# Altium footprint library Mosfet$.PcbLib: 62 footprints (part 4 of 4)
Each footprint in its own frame and in the unit in brackets; x right, y up, seen from the top. Pads: shape width x height; smd on the part's side, far side on the other; paste and mask are expansions set on the pad; w line width, h text height; cw(c..) or ccw(c..) is an arc to the next point about the centre after c.
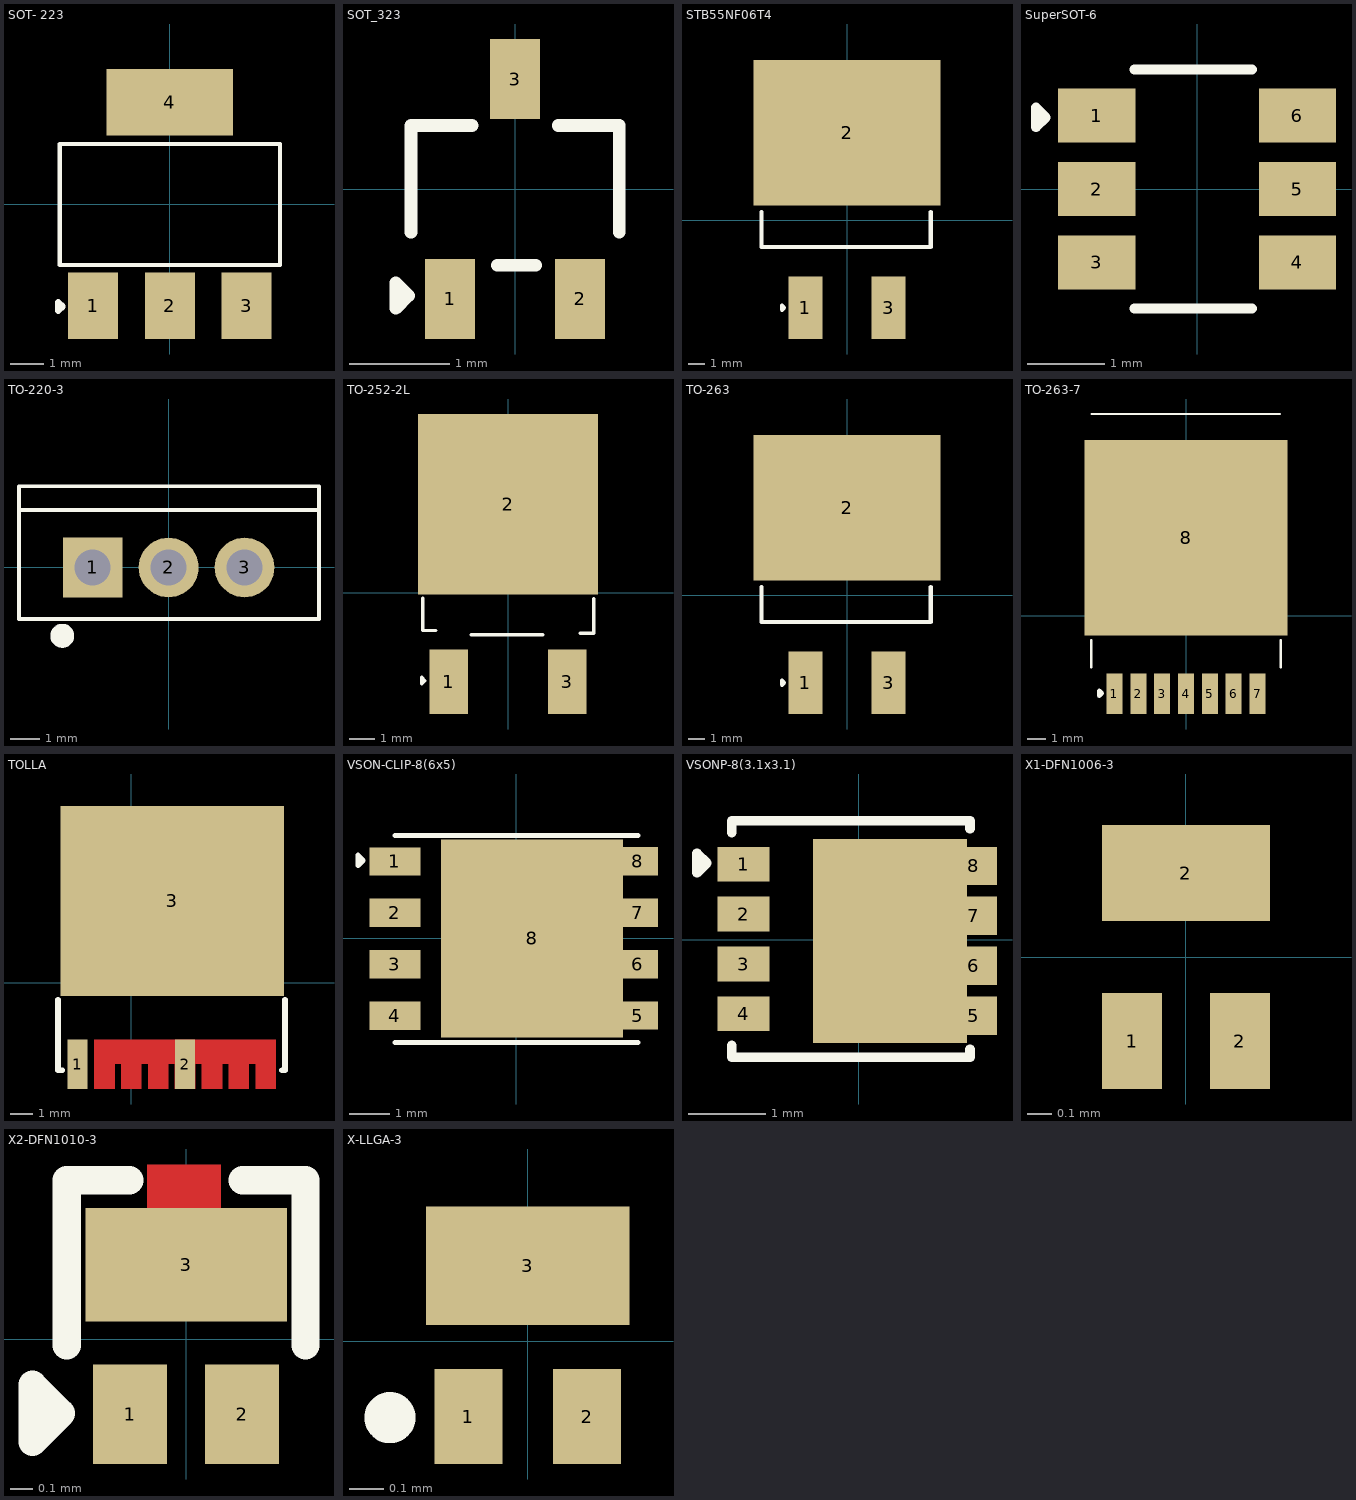
[diagram p3: the footprints below, top view; thin cyan lines are the x and y axes]

## SOT- 223 [mm]
pads (4):
  rect 1.5x2 smd: 1(-2.3,-3.05) 2(0,-3.05) 3(2.3,-3.05)
  rect 3.8x2 smd: 4(0,3.05)
Top Overlay:
  lines w0.127: -3.302,-1.829 3.302,-1.829 3.302,1.803 -3.302,1.803 -3.302,-1.829
  lines w0.2: -3.353,-3.2 -3.226,-3.073 -3.353,-2.946 -3.353,-3.2
3D body "User Library-SOT-223-1.step": height 1.61, standoff -0.04, extent -3.25,-3.5 3.25,3.5

## SOT_323 [mm]
pads (3):
  rect 0.5x0.8 smd: 1(-0.65,-1.1) 2(0.65,-1.1) 3(0,1.1)
Top Overlay:
  lines w0.127: -1.041,-0.432 -1.041,0.635 -0.432,0.635 ; -0.178,-0.762 0.203,-0.762 ; 0.432,0.635 1.041,0.635 1.041,-0.432 ; -1.194,-1.194 -1.067,-1.067 -1.194,-0.94 -1.194,-1.194
3D body "User Library-sc70-3.step": height 1, standoff 0, extent -1.05,-1.15 1.05,1.15

## STB55NF06T4 [mm]
pads (3):
  rect 2.08x3.81 smd: 1(-2.54,-5.335) 3(2.54,-5.335)
  rect 11.43x8.89 smd: 2(0,5.335)
Top Overlay:
  lines w0.254: -5.207,0.508 -5.207,-1.626 5.105,-1.626 5.105,0.508 ; -3.962,-5.461 -3.962,-5.207 -3.835,-5.334 -3.962,-5.461
3D body "pwr263s-35-8r20f.stp": height 4.5, standoff 0, extent -5.075,-6.596 5.025,8.794

## SuperSOT-6 [mm]
pads (6):
  rect 1x0.7 smd: 1(-1.3,0.95) 2(-1.3,0) 3(-1.3,-0.95) 4(1.3,-0.95) 5(1.3,0) 6(1.3,0.95)
Top Overlay:
  lines w0.127: -0.813,-1.549 0.711,-1.549 ; -0.813,1.549 0.711,1.549 ; -2.087,0.801 -2.087,1.055 -1.96,0.928 -2.087,0.801
3D body "User Library-SSOT-6.STEP": height 1.05, standoff 0, extent -1.5,-1.501 1.5,1.499

## TO-220-3 [mm]
pads (3):
  rect 2x2 hole 1.2 paste+0 mask+0.051: 1(-2.54,0)
  round 2 hole 1.2 paste+0 mask+0.051: 2(0,0) 3(2.54,0)
Top Overlay:
  lines w0.127: -5.004,1.925 5.029,1.925 ; -5.004,-1.727 5.029,-1.727 5.029,2.718 -5.004,2.718 -5.004,-1.727
  lines w0.4: -3.557,-2.086 ccw(c-3.556,-2.286) -3.555,-2.086
3D body "Mosfet.step": height 19.7, standoff -2.2, extent -5.05,-1.751 5.05,2.75

## TO-252-2L [mm]
pads (3):
  rect 1.5x2.5 smd: 1(-2.3,-3.45) 3(2.3,-3.45)
  rect 7x7 smd: 2(0,3.45)
Top Overlay:
  lines w0.127: -3.308,-0.203 -3.308,-1.457 -2.794,-1.457 ; -1.422,-1.626 1.346,-1.626 ; 2.794,-1.563 3.329,-1.563 3.329,-0.227 ; -3.353,-3.531 -3.226,-3.404 -3.353,-3.277 -3.353,-3.531
3D body "User Library-DPAK-1.STEP": height 2.34, standoff -0.07, extent -3.27,-4.311 3.27,5.627

## TO-263 [mm]
pads (3):
  rect 2.08x3.81 smd: 1(-2.54,-5.335) 3(2.54,-5.335)
  rect 11.43x8.89 smd: 2(0,5.335)
Top Overlay:
  lines w0.254: -5.207,0.508 -5.207,-1.626 5.105,-1.626 5.105,0.508 ; -3.962,-5.461 -3.962,-5.207 -3.835,-5.334 -3.962,-5.461
3D body "pwr263s-35-8r20f.stp": height 4.5, standoff 0, extent -5.075,-6.596 5.025,8.794

## TO-263-7 [mm]
pads (8):
  rect 0.85x2.16 smd: 1(-3.81,-4.16) 2(-2.54,-4.16) 3(-1.27,-4.16) 4(0,-4.16) 5(1.27,-4.16) 6(2.54,-4.16) 7(3.81,-4.16)
  rect 10.8x10.41 smd: 8(0,4.16)
Top Overlay:
  lines w0.127: -5.055,-2.743 -5.055,-1.295 ; -5.029,10.744 5.004,10.744 ; 5.055,-2.743 5.055,-1.295
  lines w0.254: -4.623,-4.262 -4.496,-4.135 -4.623,-4.008 -4.623,-4.262
3D body "User Library-TO263-7-1.STEP": height 4.78, standoff -0.02, extent -5,-4.99 5,10.68

## TOLLA [mm]
pads (3):
  rect 0.9x2.2 smd paste-100 mask+0.05: 1(-2.4,-3.65) 2(2.4,-3.65)
  rect 10x8.5 smd paste-100 mask+0.05: 3(1.825,3.65)
Top Layer:
  region: -1.65,-2.55 -1.65,-4.75 -0.75,-4.75 -0.75,-3.615 -0.45,-3.615 -0.45,-4.75 0.45,-4.75 0.45,-3.615 0.75,-3.615 0.75,-4.75 1.65,-4.75 1.65,-3.615 1.95,-3.615 1.95,-4.75 2.85,-4.75 2.85,-3.615 3.15,-3.615 3.15,-4.75 4.05,-4.75 4.05,-3.615 4.35,-3.615 4.35,-4.75 5.25,-4.75 5.25,-3.615 5.55,-3.615 5.55,-4.75 6.45,-4.75 6.45,-3.615 6.45,-2.551 6.45,-2.55 5.55,-2.55 5.55,-2.551 5.25,-2.551 5.25,-2.55 4.35,-2.55 4.35,-2.551 4.05,-2.551 4.05,-2.55 3.15,-2.55 3.15,-2.551 2.85,-2.551 2.85,-2.55 1.95,-2.55 1.95,-2.551 1.65,-2.551 1.65,-2.55 0.75,-2.55 0.75,-2.551 0.45,-2.551 0.45,-2.55 -0.45,-2.55 -0.45,-2.551 -0.75,-2.551 -0.75,-2.55 -1.65,-2.55
Top Overlay:
  lines w0.254: -3.275,-0.76 -3.275,-3.91 -3.081,-3.91 ; 6.731,-3.91 6.865,-3.91 6.865,-0.76
Top Paste:
  region: -3.175,7.9 6.825,7.9 6.825,-0.6 -3.175,-0.6
  region: -2.85,-2.55 -1.95,-2.55 -1.95,-4.75 -2.85,-4.75
  region: -1.65,-2.55 -1.65,-4.75 -0.75,-4.75 -0.75,-3.615 -0.45,-3.615 -0.45,-4.75 0.45,-4.75 0.45,-3.615 0.75,-3.615 0.75,-4.75 1.65,-4.75 1.65,-3.615 1.95,-3.615 1.95,-4.75 2.85,-4.75 2.85,-3.615 3.15,-3.615 3.15,-4.75 4.05,-4.75 4.05,-3.615 4.35,-3.615 4.35,-4.75 5.25,-4.75 5.25,-3.615 5.55,-3.615 5.55,-4.75 6.45,-4.75 6.45,-3.615 6.45,-2.551 6.45,-2.55 5.55,-2.55 5.55,-2.551 5.25,-2.551 5.25,-2.55 4.35,-2.55 4.35,-2.551 4.05,-2.551 4.05,-2.55 3.15,-2.55 3.15,-2.551 2.85,-2.551 2.85,-2.55 1.95,-2.55 1.95,-2.551 1.65,-2.551 1.65,-2.55 0.75,-2.55 0.75,-2.551 0.45,-2.551 0.45,-2.55 -0.45,-2.55 -0.45,-2.551 -0.75,-2.551 -0.75,-2.55
3D body "C3291324.step": height 2.32, standoff 0, extent -3.155,-4.215 6.745,7.365

## VSON-CLIP-8(6x5) [mm]
pads (9):
  rect 1.27x0.7 smd paste-100 mask+0.051: 1(-3,1.904) 2(-3,0.636) 3(-3,-0.636) 4(-3,-1.906)
  rect 1x0.7 smd paste-100 mask+0.051: 5(3,-1.904) 6(3,-0.634) 7(3,0.636) 8(3,1.906)
  rect 4.5x4.9 smd paste-100 mask+0.051: 8(0.39,0.001)
Top Overlay:
  lines w0.127: -3,-2.575 3,-2.575 ; -3,2.549 3,2.549 ; -3.914,1.802 -3.787,1.929 -3.914,2.056 -3.914,1.802
Top Paste:
  region: -2.365,-1.556 -2.365,-2.256 -3.635,-2.256 -3.635,-1.556
  region: -2.365,-0.286 -2.365,-0.986 -3.635,-0.986 -3.635,-0.286
  region: -2.365,0.986 -2.365,0.286 -3.635,0.286 -3.635,0.986
  region: -2.365,2.254 -2.365,1.554 -3.635,1.554 -3.635,2.254
  region: 3.5,-2.254 2.64,-2.254 2.64,-2.449 -1.86,-2.449 -1.86,2.451 2.64,2.451 2.64,2.256 3.5,2.256 3.5,1.556 2.639,1.556 2.639,0.986 3.5,0.986 3.5,0.286 2.64,0.286 2.64,-0.284 3.5,-0.284 3.5,-0.984 2.64,-0.984 2.64,-1.554 3.5,-1.554
3D body "CSD18504Q5A.step": height 1.1, standoff 0, extent -3,-2.45 3,2.45

## VSONP-8(3.1x3.1) [mm]
pads (9):
  rect 0.68x0.45 smd paste-100 mask+0.05: 1(-1.498,0.988) 2(-1.498,0.338) 3(-1.498,-0.313) 4(-1.498,-0.962)
  rect 0.6x0.5 smd paste-100 mask+0.05: 5(1.498,-0.988) 6(1.498,-0.338) 7(1.498,0.312) 8(1.498,0.962)
  rect 2x2.65 smd paste-100 mask+0.05: ""(0.407,-0.013)
Top Overlay:
  lines w0.127: -1.651,-1.372 -1.651,-1.524 1.448,-1.524 1.448,-1.423 ; -1.651,1.397 -1.651,1.549 1.448,1.549 1.448,1.448 ; -2.104,0.873 -1.977,1 -2.104,1.127 -2.104,0.873
Top Paste:
  region: -1.249,0.838 -1.649,0.838 -1.649,1.138 -1.249,1.138
  region: -1.249,0.188 -1.649,0.188 -1.649,0.488 -1.249,0.488
  region: -1.249,-0.463 -1.649,-0.463 -1.649,-0.163 -1.249,-0.163
  region: -1.249,-1.112 -1.649,-1.112 -1.649,-0.812 -1.249,-0.812
  region: 1.232,1.257 -0.419,1.257 -0.419,-1.283 1.232,-1.283
  region: 1.398,1.112 1.798,1.112 1.798,0.812 1.398,0.812
  region: 1.398,0.462 1.798,0.462 1.798,0.162 1.398,0.162
  region: 1.398,-0.188 1.798,-0.188 1.798,-0.488 1.398,-0.488
  region: 1.398,-0.838 1.798,-0.838 1.798,-1.138 1.398,-1.138
3D body "C478471.step": height 0.81, standoff 0, extent -1.611,-1.663 1.409,1.637

## X1-DFN1006-3 [mm]
pads (3):
  rect 0.25x0.4 smd mask+0.085: 1(-0.225,-0.35) 2(0.225,-0.35)
  rect 0.7x0.4 smd mask+0.085: 2(0,0.35)

## X2-DFN1010-3 [mm]
pads (3):
  rect 0.33x0.445 smd: 1(-0.25,-0.334) 2(0.25,-0.334)
  rect 0.9x0.505 smd: 3(0,0.334)
Top Layer:
  rectangle: -0.174,0.581 0.156,0.781
Top Overlay:
  lines w0.127: -0.533,-0.025 -0.533,0.711 -0.254,0.711 ; 0.254,0.711 0.533,0.711 0.533,-0.025 ; -0.686,-0.457 -0.686,-0.203 -0.559,-0.33 -0.686,-0.457
3D body "DMN1045UFR4.STEP": height 0.35, standoff -0.02, extent -0.5,-0.393 0.5,0.647

## X-LLGA-3 [mm]
pads (3):
  rect 0.2x0.28 smd mask+0.05: 1(-0.175,-0.222) 2(0.175,-0.222)
  rect 0.6x0.35 smd mask+0.05: 3(0,0.223)
Top Overlay:
  circle w0.1: c-0.406,-0.226 r0.025
3D body "NTNS3193NZT5G.STEP": height 0.29, standoff -0.02, extent -0.31,-0.31 0.31,0.31